# Altium schematic symbol library 629104190121.SchLib: 1 symbol
Pins are listed as number, name and electrical type; pins without a type are passive.

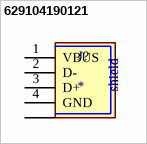
[diagram p0: symbol 629104190121]

## 629104190121
designator J?
MF: {'manufacturer': u'W\xfcrth Elektronik'}; MP: 629104190121; Package: None; Price: None; Value: *; Availability: Unavailable
footprint 629104190121
pins: 1 VBUS, 2 D-, 3 D+, 4 GND, S1 SHIELD, S2 SHIELD, S3 SHIELD, S4 SHIELD
text: shield